# Altium footprint library Seeed_Studio_XIAO_Series_Footprints.PcbLib: 34 footprints (part 3 of 3)
Each footprint in its own frame and in the unit in brackets; x right, y up, seen from the top. Pads: shape width x height; smd on the part's side, far side on the other; paste and mask are expansions set on the pad; w line width, h text height; cw(c..) or ccw(c..) is an arc to the next point about the centre after c.
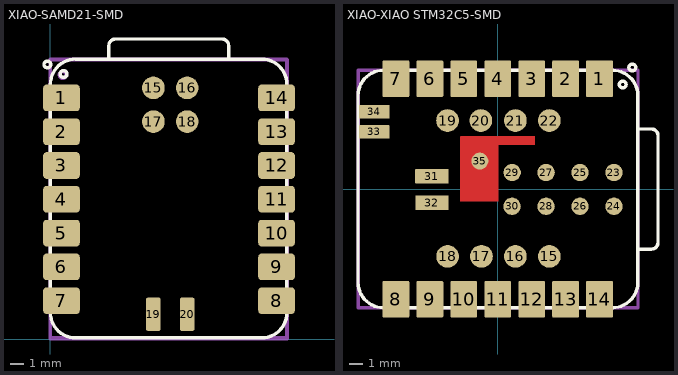
[diagram p2: the footprints below, top view; thin cyan lines are the x and y axes]

## XIAO-SAMD21-SMD [mm]
pads (20):
  rrect25% 2.75x2 smd: 1(0.835,18.12) 2(0.835,15.58) 3(0.835,13.04) 4(0.835,10.5) 5(0.835,7.96) 6(0.835,5.42) 7(0.835,2.88) 8(17,2.88) 9(17,5.42) 10(17,7.96) 11(17,10.5) 12(17,13.04) 13(17,15.58) 14(17,18.12)
  round 1.7 smd: 15(7.747,18.878) 16(10.287,18.878) 17(7.747,16.338) 18(10.287,16.338)
  rrect25% 1.1x2.5 smd: 19(7.747,1.86) 20(10.287,1.86)
F.SilkS:
  circle w0.254: c-0.225,20.633 r0.254
  circle w0.254: c0.992,19.91 r0.254
  lines w0.254: 0.001,19.132 0.001,1.987 ccw(c1.906,1.987) 1.906,0.082 15.876,0.082 ccw(c15.876,1.987) 17.781,1.987 17.781,19.132 ccw(c15.876,19.132) 15.876,21.037 ; 0.001,19.136 cw(c1.906,19.136) 1.906,21.041 ; 4.396,21.037 4.4,22.048 cw(c4.9,22.047) 4.9,22.547 12.895,22.547 cw(c12.895,22.047) 13.395,22.047 13.395,21.037 ; 15.876,21.037 1.906,21.037 15.876,21.037
F.CrtYd:
  lines w0.254: 0,0 0,21 17.8,21 17.8,0 0,0
F.Fab:
  circle w0.254: c0.49,18.11 r0.127
  circle w0.254: c0.93,19.853 r0.254
  lines w0.254: -0.009,0.086 -0.009,21.036 17.781,21.036 17.781,0.086 -0.009,0.086 ; 0,0 0,21 17.8,21 17.8,0 0,0

## XIAO-XIAO STM32C5-SMD [mm]
pads (35):
  rrect10% 2x2.75 smd: 1(7.62,8.255) 2(5.08,8.255) 3(2.54,8.255) 4(0,8.255) 5(-2.54,8.255) 6(-5.08,8.255) 7(-7.62,8.255) 8(-7.62,-8.255) 9(-5.08,-8.255) 10(-2.54,-8.255) 11(0,-8.255) 12(2.54,-8.255) 13(5.08,-8.255) 14(7.62,-8.255)
  round 1.7 smd: 15(3.862,-5.044) 16(1.322,-5.044) 17(-1.217,-5.04) 18(-3.754,-5.046) 19(-3.76,5.127) 20(-1.266,5.128) 21(1.322,5.126) 22(3.862,5.126)
  round 1.3 smd: 23(8.703,1.232) 24(8.703,-1.295) 25(6.163,1.232) 26(6.163,-1.295) 27(3.623,1.232) 28(3.623,-1.295) 29(1.083,1.232) 30(1.077,-1.295)
  rrect10% 2.5x1.1 smd: 31(-4.928,0.961) 32(-4.923,-1.039)
  rrect10% 2.3x1 smd: 33(-9.248,4.276) 34(-9.248,5.778)
  round 1.27 smd: 35(-1.34,2.09)
F.Cu:
  region: 2.79,3.91 2.79,3.324 2.771,3.305 0.04,3.305 0.04,-0.924 -2.804,-0.924 -2.804,3.916 -2.787,3.934 2.766,3.934
  region: -0.188,2.711 -0.126,2.669 -0.085,2.607 -0.07,2.535 -0.07,1.646 -0.085,1.573 -0.126,1.511 -0.188,1.47 -0.26,1.455 -2.419,1.455 -2.492,1.47 -2.554,1.511 -2.595,1.573 -2.61,1.646 -2.61,2.535 -2.595,2.607 -2.554,2.669 -2.492,2.711 -2.419,2.725 -0.26,2.725
F.SilkS:
  circle w0.254: c9.358,7.826 r0.254
  circle w0.254: c10.075,9.1 r0.254
  lines w0.254: -8.559,-8.89 cw(c-8.559,-6.985) -10.464,-6.985 -10.464,6.985 cw(c-8.559,6.985) -8.559,8.89 ; -8.509,-8.89 8.636,-8.89 ; -8.509,8.89 8.636,8.89 ; 8.586,-8.89 ccw(c8.586,-6.985) 10.491,-6.985 10.491,6.985 ; 8.59,8.89 cw(c8.59,6.985) 10.495,6.985 ; 10.491,-4.504 11.501,-4.504 ccw(c11.501,-4.004) 12.001,-4.004 12.001,3.991 ccw(c11.501,3.991) 11.501,4.491 10.491,4.495
F.Paste:
  region: 2.79,3.91 2.79,3.324 2.771,3.305 0.04,3.305 0.04,-0.924 -2.804,-0.924 -2.804,3.916 -2.787,3.934 2.766,3.934
  region: -0.188,2.711 -0.126,2.669 -0.085,2.607 -0.07,2.535 -0.07,1.646 -0.085,1.573 -0.126,1.511 -0.188,1.47 -0.26,1.455 -2.419,1.455 -2.492,1.47 -2.554,1.511 -2.595,1.573 -2.61,1.646 -2.61,2.535 -2.595,2.607 -2.554,2.669 -2.492,2.711 -2.419,2.725 -0.26,2.725
F.Mask:
  region: 2.79,3.91 2.79,3.324 2.771,3.305 0.04,3.305 0.04,-0.924 -2.804,-0.924 -2.804,3.916 -2.787,3.934 2.766,3.934
  region: -0.188,2.711 -0.126,2.669 -0.085,2.607 -0.07,2.535 -0.07,1.646 -0.085,1.573 -0.126,1.511 -0.188,1.47 -0.26,1.455 -2.419,1.455 -2.492,1.47 -2.554,1.511 -2.595,1.573 -2.61,1.646 -2.61,2.535 -2.595,2.607 -2.554,2.669 -2.492,2.711 -2.419,2.725 -0.26,2.725
F.CrtYd:
  lines w0.254: -10.45,-8.9 -10.45,8.9 10.5,8.9 10.5,-8.9 -10.45,-8.9
F.Fab:
  lines w0.254: -10.45,-8.9 -10.45,8.9 10.5,8.9 10.5,-8.9 -10.45,-8.9